# Altium schematic symbol library Components - 27.10.26 - 16.13.SchLib: 1 symbol
Pins are listed as number, name and electrical type; pins without a type are passive.

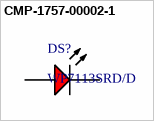
[diagram p0: symbol CMP-1757-00002-1]

## CMP-1757-00002-1
designator DS?, comment WP7113SRD/D
The Super Bright Red Source Color Device, 1.85 V, -40 to 85 degC, 2-Pin THD, RoHS, Tape and Reel; Density: 1 MB; Min Supply Voltage: 1.71 V; Max Clock Frequency: 120 MHz; Max Supply Voltage: 3.6 V; Interface: UART; RAM Size: 128 KB; Case\Package: LQFP; Max Operating Temperature: 105 degC; Weight: 0.012224 oz; REACH SVHC: No SVHC; DatasheetVersion: Rev. 6A, 07/2016; Package Quantity: 160; Packaging: Tray; ComponentLink1Description: Datasheet; Min Operating Temperature: -40 degC; PackageDescription: 2-Pin Through Hole Device, Dia 5.9 mm, Body Length 8.6 mm; Pins: 64; PackageReference: WP7113SRDD; ComponentLink1URL: http://www.kingbrightusa.com/images/catalog/SPEC/WP7113SRD-D.pdf; RoHSCompliant: true
footprint KING-WP7113SRDD_V (THD, 2-Leads, Dia 5.9mm, Body Length 8.6mm)
pins: 1 A, 2 K